# Altium footprint library Miscellaneous Header.PcbLib: 164 footprints (part 8 of 11)
Each footprint in its own frame and in the unit in brackets; x right, y up, seen from the top. Pads: shape width x height; smd on the part's side, far side on the other; paste and mask are expansions set on the pad; w line width, h text height; cw(c..) or ccw(c..) is an arc to the next point about the centre after c.
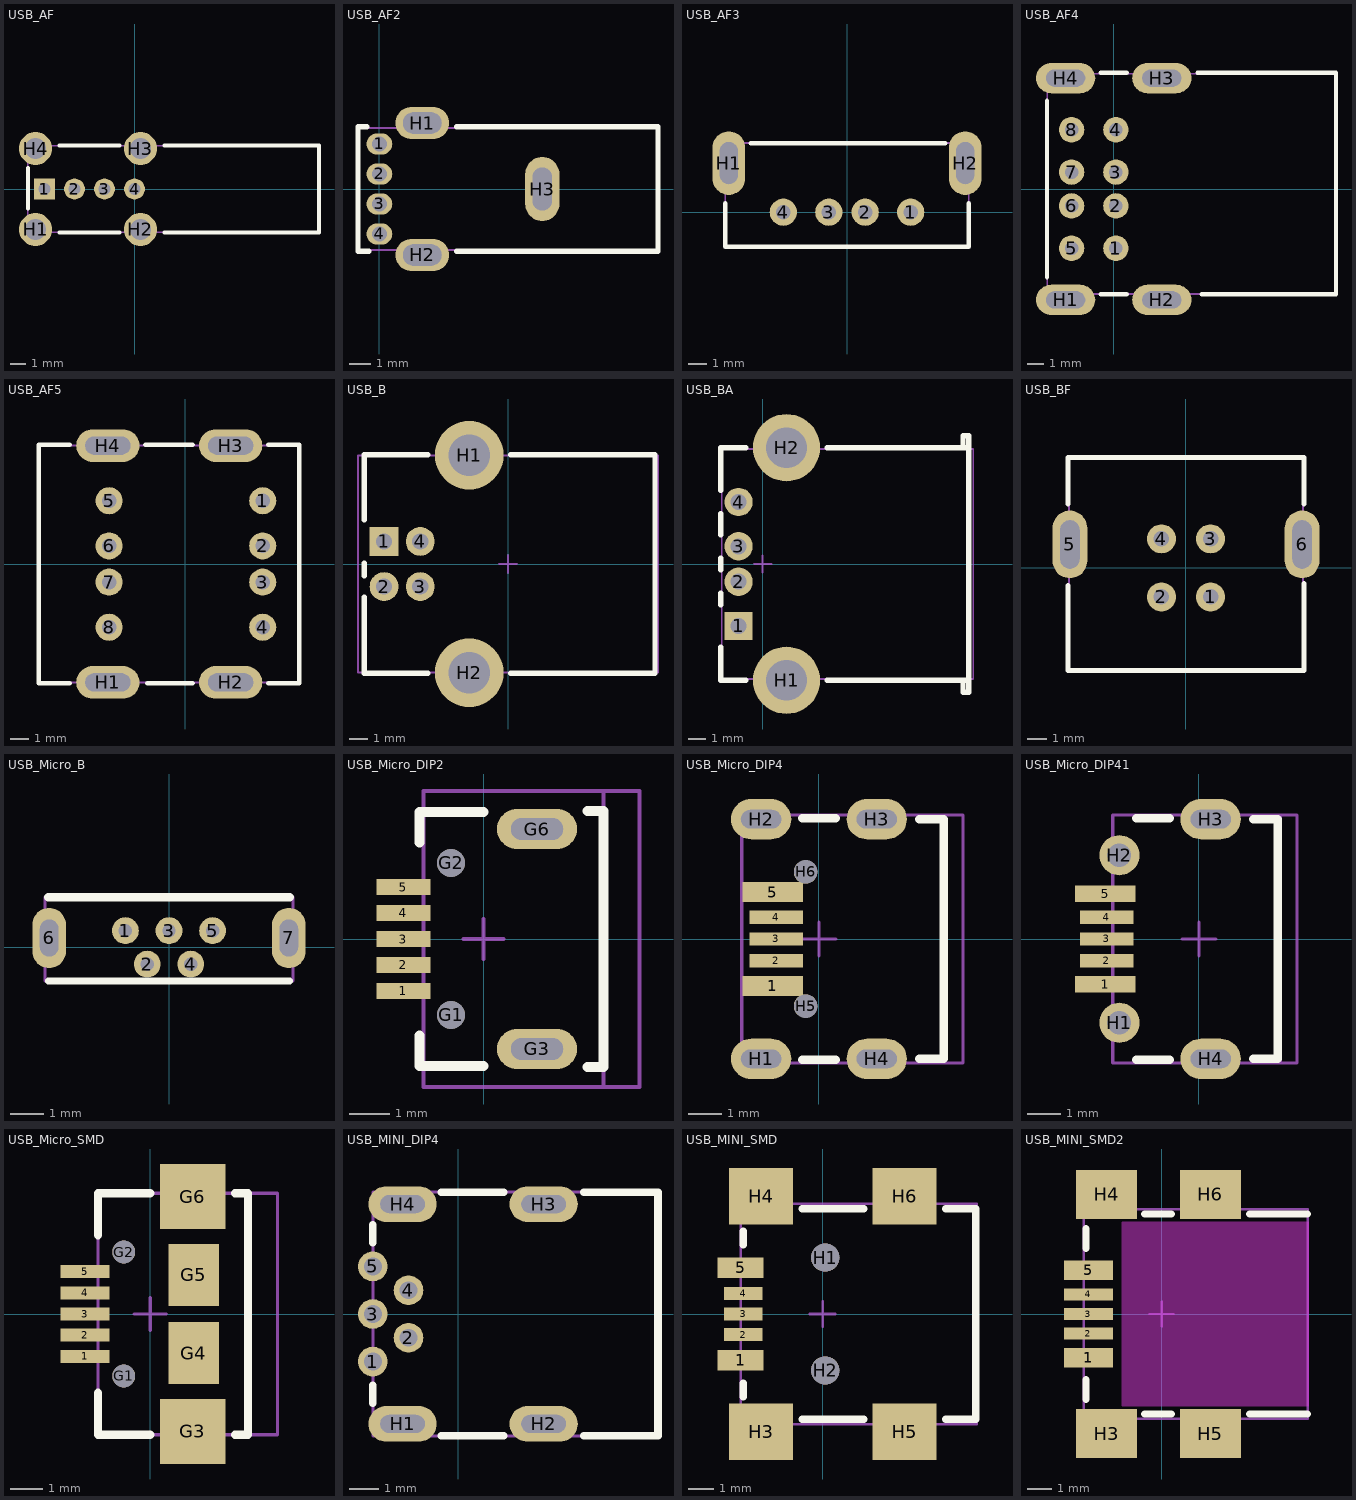
[diagram p7: the footprints below, top view; thin cyan lines are the x and y axes]

## USB_AF [mm]
pads (8):
  rect 1.4x1.4 hole 0.8: 1(-6,0)
  round 1.4 hole 0.8: 2(-4,0) 3(-2,0) 4(0,0)
  round 2.2 hole 1.4: H1(-6.6,-2.7) H2(0.4,-2.7) H3(0.4,2.7) H4(-6.6,2.7)
Top Overlay:
  lines w0.254: -7.1,-1.3 -7.1,1.4 ; -5,-2.9 -1,-2.9 ; -5,2.9 -1,2.9 ; 2,-2.9 12.3,-2.9 12.3,2.9 2,2.9
Mechanical 15:
  lines w0.1: -7.1,-2.875 12.3,-2.875 12.3,2.875 -7.1,2.875 -7.1,-2.875
3D body: height 14.6, standoff -0.87, extent -7,-3.5 12.35,3.5

## USB_AF2 [mm]
pads (7):
  oval 1.2x1 hole 0.7: 1(0,2.1) 2(0,0.7) 3(0,-0.7) 4(0,-2.1)
  oval 2.5x1.5 hole 1 slot 1.8 at 0 deg: H1(2,3.08) H2(2,-3.08)
  oval 1.6x3 hole 0.9 slot 2 at 90 deg: H3(7.6,0)
Top Overlay:
  lines w0.254: -0.6,2.9 -1,2.9 -1,-2.9 -0.5,-2.9 ; 3.6,-2.9 13,-2.9 13,2.9 3.6,2.9
Mechanical 15:
  lines w0.1: -1,-2.85 13,-2.85 13,2.85 -1,2.85 -1,-2.85

## USB_AF3 [mm]
pads (6):
  round 1.5 hole 0.8: 1(3.5,0) 2(1,0) 3(-1,0) 4(-3.5,0)
  oval 1.8x3.5 hole 1 slot 2.3 at 90 deg: H1(-6.5,2.7) H2(6.5,2.7)
Top Overlay:
  lines w0.254: -6.7,0.5 -6.7,-1.9 6.7,-1.9 6.7,0.5 ; -5.3,3.8 5.4,3.8
Mechanical 15:
  lines w0.1: -6.7,-1.9 -6.7,3.8 6.7,3.8 6.7,-1.9 -6.7,-1.9
3D body: height 15.1, standoff -3.81, extent -7.825,-2.32 7.825,4.8

## USB_AF4 [mm]
pads (12):
  round 1.5 hole 0.8: 1(0.13,-3.5) 2(0.13,-1) 3(0.13,1) 4(0.13,3.5) 5(-2.49,-3.5) 6(-2.49,-1) 7(-2.49,1) 8(-2.49,3.5)
  oval 3.5x1.8 hole 1 slot 2.3 at 0 deg: H1(-2.84,-6.55) H2(2.84,-6.55) H3(2.84,6.55) H4(-2.84,6.55)
Top Overlay:
  lines w0.254: -3.937,-5.207 -3.937,5.207 ; -0.762,-6.223 0.762,-6.223 ; -0.762,6.858 0.762,6.858 ; 4.953,6.858 13.13,6.858 13.13,-6.223 5.207,-6.223
Mechanical 15:
  lines w0.1: -3.934,-6.2 -3.934,6.8 13.13,6.8 13.13,-6.2 -3.934,-6.2

## USB_AF5 [mm]
pads (12):
  round 1.5 hole 0.8: 1(4.285,3.5) 2(4.285,1) 3(4.285,-1) 4(4.285,-3.5) 5(-4.215,3.5) 6(-4.215,1) 7(-4.215,-1) 8(-4.215,-3.5)
  oval 3.5x1.8 hole 1 slot 2.5 at 0 deg: H1(-4.285,-6.55) H2(2.515,-6.55) H3(2.515,6.55) H4(-4.285,6.55)
Top Overlay:
  lines w0.254: -6.4,-6.6 -8.1,-6.6 -8.1,6.6 -6.4,6.6 ; -2.2,6.6 0.4,6.6 ; -2.1,-6.6 0.4,-6.6 ; 4.6,-6.6 6.3,-6.6 6.3,6.6 4.6,6.6
Mechanical 15:
  lines w0.1: -8.035,-6.55 6.265,-6.55 6.265,6.55 -8.035,6.55 -8.035,-6.55
3D body: height 17.55, standoff -3.6, extent -9.7,-8.005 6.9,8

## USB_B [mm]
pads (6):
  rect 1.6x1.6 hole 0.9: 1(-6.855,1.25)
  round 1.6 hole 0.9: 2(-6.855,-1.25) 3(-4.855,-1.25) 4(-4.855,1.25)
  round 3.8 hole 2.3: H1(-2.145,6.02) H2(-2.145,-6.02)
Top Overlay:
  lines w0.3: -7.965,-1.85 -7.965,-6.05 -4.445,-6.05 ; -7.965,-0.65 -7.965,0.05 ; -7.965,2.45 -7.965,6.05 -4.445,6.05 ; 0.155,-6.05 8.135,-6.05 8.135,6.05 0.155,6.05
Mechanical 15:
  lines w0.1: -0.5,0 0.5,0 ; 0,-0.5 0,0.5 ; -8.3,-6 -8.3,6 8.3,6 8.3,-6 -8.3,-6
3D body: height 11, standoff -3.64, extent -8.25,-7.397 8.25,7.4

## USB_BA [mm]
pads (6):
  rect 1.6x1.6 hole 0.9: 1(-1.355,-3.5)
  round 1.6 hole 0.9: 2(-1.355,-1) 3(-1.355,1) 4(-1.355,3.5)
  round 3.8 hole 2.3: H1(1.355,-6.57) H2(1.355,6.57)
Top Overlay:
  lines w0.3: -2.365,-4.7 -2.365,-6.565 -0.945,-6.565 ; -2.365,-2.3 -2.365,-1.66 ; -2.365,-0.34 -2.365,0.34 ; -2.365,1.66 -2.365,2.84 ; -2.365,4.16 -2.365,6.565 -0.945,6.565 ; 3.655,-6.565 11.635,-6.565 ; 3.655,6.565 11.635,6.565 ; 11.315,-6.565 11.315,-7.25 11.635,-7.25 11.635,-6.565 ; 11.315,6.565 11.315,7.25 11.635,7.25 11.635,6.565 ; 11.635,-6.565 11.635,6.565
Mechanical 15:
  lines w0.1: -0.5,0 0.5,0 ; 0,-0.5 0,0.5 ; -2.3,-6.5 -2.3,6.5 11.9,6.5 11.9,-6.5 -2.3,-6.5
3D body: height 7.55, standoff -3.37, extent -2.3,-7.9 11.8,7.9

## USB_BF [mm]
pads (6):
  round 1.5 hole 0.8: 1(1.27,-1.5) 2(-1.27,-1.5) 3(1.27,1.5) 4(-1.27,1.5)
  oval 1.8x3.5 hole 1 slot 2.5 at 90 deg: 5(-6,1.21) 6(6,1.21)
Top Overlay:
  lines w0.254: -6.1,-0.9 -6.1,-5.3 6.1,-5.3 6.1,-0.8 ; -6.1,3.3 -6.1,5.7 6.1,5.7 6.1,3.3
Mechanical 15:
  lines w0.1: -6.05,-5.3 -6.05,5.7 6.05,5.7 6.05,-5.3 -6.05,-5.3
3D body: height 16, standoff -3.8, extent -7.146,-5.4 7.146,5.9

## USB_Micro_B [mm]
pads (7):
  round 0.8 hole 0.4: 1(-1.3,0.5) 2(-0.65,-0.5) 3(0,0.5) 4(0.65,-0.5) 5(1.3,0.5)
  oval 1x1.8 hole 0.55 slot 1.1 at 90 deg: 6(-3.575,0.28) 7(3.575,0.28)
Top Overlay:
  lines w0.2: -3.6,-1 3.6,-1
  lines w0.254: -3.6,1.5 3.6,1.5
Mechanical 15:
  lines w0.1: -3.7,-1 -3.7,1.5 3.7,1.5 3.7,-1 -3.7,-1
3D body: height 6.94, standoff -0.97, extent -4.025,-1.315 3.975,1.7

## USB_Micro_DIP2 [mm]
pads (9):
  rect 1.35x0.4 smd: 1(-2,-1.3) 2(-2,-0.65) 3(-2,0) 4(-2,0.65) 5(-2,1.3)
  round 0.7 hole 0.7 unplated: G1(-0.813,-1.9) G2(-0.813,1.9)
  oval 2x1 hole 0.55 slot 1.3 at 0 deg: G3(1.337,-2.75) G6(1.337,2.75)
Top Overlay:
  lines w0.254: -1.6,-2.413 -1.6,-3.175 0,-3.175 ; -1.6,2.413 -1.6,3.175 0,3.175 ; 2.6,-3.2 3,-3.2 3,3.2 2.6,3.2
Mechanical 15:
  lines w0.1: -0.5,0 0.5,0 ; 0,-0.5 0,0.5 ; 3,-3.7 3,3.7 ; -1.5,-3.7 -1.5,3.7 3.9,3.7 3.9,-3.7 -1.5,-3.7
3D body: height 2.68, standoff -0.63, extent -1.515,-4.1 3.915,4.1

## USB_Micro_DIP4 [mm]
pads (11):
  rect 1.8x0.6 smd: 1(-1.375,-1.4) 5(-1.375,1.4)
  rect 1.6x0.4 smd: 2(-1.275,-0.65) 3(-1.275,0) 4(-1.275,0.65)
  oval 1.8x1.2 hole 0.55 slot 1.2 at 0 deg: H1(-1.725,-3.575) H2(-1.725,3.575) H3(1.725,3.575) H4(1.725,-3.575)
  round 0.7 hole 0.7 unplated: H5(-0.4,-2) H6(-0.4,2)
Top Overlay:
  lines w0.254: -0.5,-3.6 0.5,-3.6 ; -0.5,3.6 0.5,3.6 ; 3,-3.575 3.725,-3.575 3.725,3.575 3,3.575
Mechanical 15:
  lines w0.1: -0.5,0 0.5,0 ; 0,-0.5 0,0.5 ; 3.7,-3.7 3.7,3.7 ; -2.3,-3.7 -2.3,3.7 4.3,3.7 4.3,-3.7 -2.3,-3.7
3D body: height 2.68, standoff -0.63, extent -1.13,-4.1 4.3,4.1

## USB_Micro_DIP41 [mm]
pads (9):
  rect 1.8x0.5 smd: 1(-2.8,-1.35) 5(-2.8,1.35)
  rect 1.6x0.4 smd: 2(-2.75,-0.65) 3(-2.75,0) 4(-2.75,0.65)
  round 1.2 hole 0.7: H1(-2.375,-2.5) H2(-2.375,2.5)
  oval 1.8x1.2 hole 0.55 slot 1.2 at 0 deg: H3(0.35,3.575) H4(0.35,-3.575)
Top Overlay:
  lines w0.254: -1.875,-3.6 -0.875,-3.6 ; -1.875,3.6 -0.875,3.6 ; 1.625,-3.575 2.35,-3.575 2.35,3.575 1.625,3.575
Mechanical 15:
  lines w0.1: -0.5,0 0.5,0 ; 0,-0.5 0,0.5 ; 2.425,-3.7 2.925,-3.7 2.925,3.7 2.425,3.7 ; 2.425,-3.7 -2.575,-3.7 -2.575,3.7 2.425,3.7 ; 2.425,-3.7 2.425,3.7
3D body: height 2.68, standoff -0.63, extent -2.505,-4.1 2.925,4.1

## USB_Micro_SMD [mm]
pads (11):
  rect 1.5x0.4 smd: 1(-2,-1.3) 2(-2,-0.65) 3(-2,0) 4(-2,0.65) 5(-2,1.3)
  round 0.7 hole 0.7 unplated: G1(-0.813,-1.9) G2(-0.813,1.9)
  rect 2x2 smd: G3(1.3,-3.6) G6(1.3,3.6)
  rect 1.55x1.9 smd: G4(1.338,-1.2) G5(1.338,1.2)
Top Overlay:
  lines w0.254: -1.6,-2.413 -1.6,-3.7 0,-3.7 ; -1.6,2.413 -1.6,3.7 0,3.7 ; 2.6,-3.7 3,-3.7 3,3.7 2.6,3.7
Mechanical 15:
  lines w0.1: -0.5,0 0.5,0 ; 0,-0.5 0,0.5 ; 3,-3.7 3,3.7 ; -1.6,-3.7 3.9,-3.7 3.9,3.7 -1.6,3.7 -1.6,-3.7
3D body: height 2.72, standoff -0.22, extent -1.53,-3.99 3.9,3.99

## USB_MINI_DIP4 [mm]
pads (9):
  round 1 hole 0.6: 1(-2.875,-1.6) 2(-1.675,-0.8) 3(-2.875,0) 4(-1.675,0.8) 5(-2.875,1.6)
  oval 2.3x1.2 hole 0.6 slot 1.5 at 0 deg: H1(-1.875,-3.7) H2(2.875,-3.7) H3(2.875,3.7) H4(-1.875,3.7)
Top Overlay:
  lines w0.254: -2.875,-3 -2.875,-2.4 ; -2.875,2.4 -2.875,3 ; -0.575,-4.1 1.525,-4.1 ; -0.575,4.1 1.525,4.1 ; 4.225,-4.1 6.725,-4.1 6.725,4.1 4.225,4.1
Mechanical 15:
  lines w0.1: -2.875,-4.1 6.725,-4.1 6.725,4.1 -2.875,4.1 -2.875,-4.1
3D body: height 3.95, standoff -1.8, extent -3.075,-3.85 5.925,3.85

## USB_MINI_SMD [mm]
pads (11):
  rect 1.8x0.8 smd: 1(-3.2,-1.8) 5(-3.2,1.8)
  rect 1.5x0.5 smd: 2(-3.1,-0.8) 3(-3.1,0) 4(-3.1,0.8)
  round 1.1 hole 1.1 unplated: H1(0.1,2.2) H2(0.1,-2.2)
  rect 2.5x2.2 smd: H3(-2.4,-4.6) H4(-2.4,4.6) H5(3.2,-4.6) H6(3.2,4.6)
Top Overlay:
  lines w0.3: -3.1,-2.7 -3.099,-3.226 ; -3.1,2.7 -3.099,3.226 ; -0.8,-4.1 1.6,-4.1 ; -0.8,4.1 1.6,4.1 ; 4.8,-4.1 5.969,-4.1 5.969,4.1 4.8,4.1
Mechanical 15:
  lines w0.1: -0.5,0 0.5,0 ; 0,-0.5 0,0.5 ; -3.2,-4.3 6,-4.3 6,4.3 -3.2,4.3 -3.2,-4.3
3D body: height 3.95, standoff -1, extent -3.2,-5.35 6,5.35

## USB_MINI_SMD2 [mm]
pads (9):
  rect 2x0.8 smd: 1(-3,-1.8) 5(-3,1.8)
  rect 2x0.5 smd: 2(-3,-0.8) 3(-3,0) 4(-3,0.8)
  rect 2.5x2 smd: H3(-2.25,-4.9) H4(-2.25,4.9) H5(2,-4.9) H6(2,4.9)
Top Overlay:
  lines w0.3: -3.1,-3.5 -3.1,-2.7 ; -3.1,2.7 -3.1,3.5 ; -0.7,-4.1 0.4,-4.1 ; -0.7,4.1 0.4,4.1 ; 3.6,-4.1 5.969,-4.1 ; 3.6,4.1 5.969,4.1
Keep-Out Layer:
  board cut-out: 6,3.75 -1.6,3.75 -1.6,-3.75 6,-3.75
  lines w0.1: -1.6,-3.75 6,-3.75 6,3.75 -1.6,3.75 -1.6,-3.75
Mechanical 15:
  lines w0.1: -0.5,0 0.5,0 ; 0,-0.5 0,0.5 ; -3.2,-4.3 6,-4.3 6,4.3 -3.2,4.3 -3.2,-4.3